# Altium schematic symbol library Ic%.SchLib: 452 symbols (part 6 of 12)
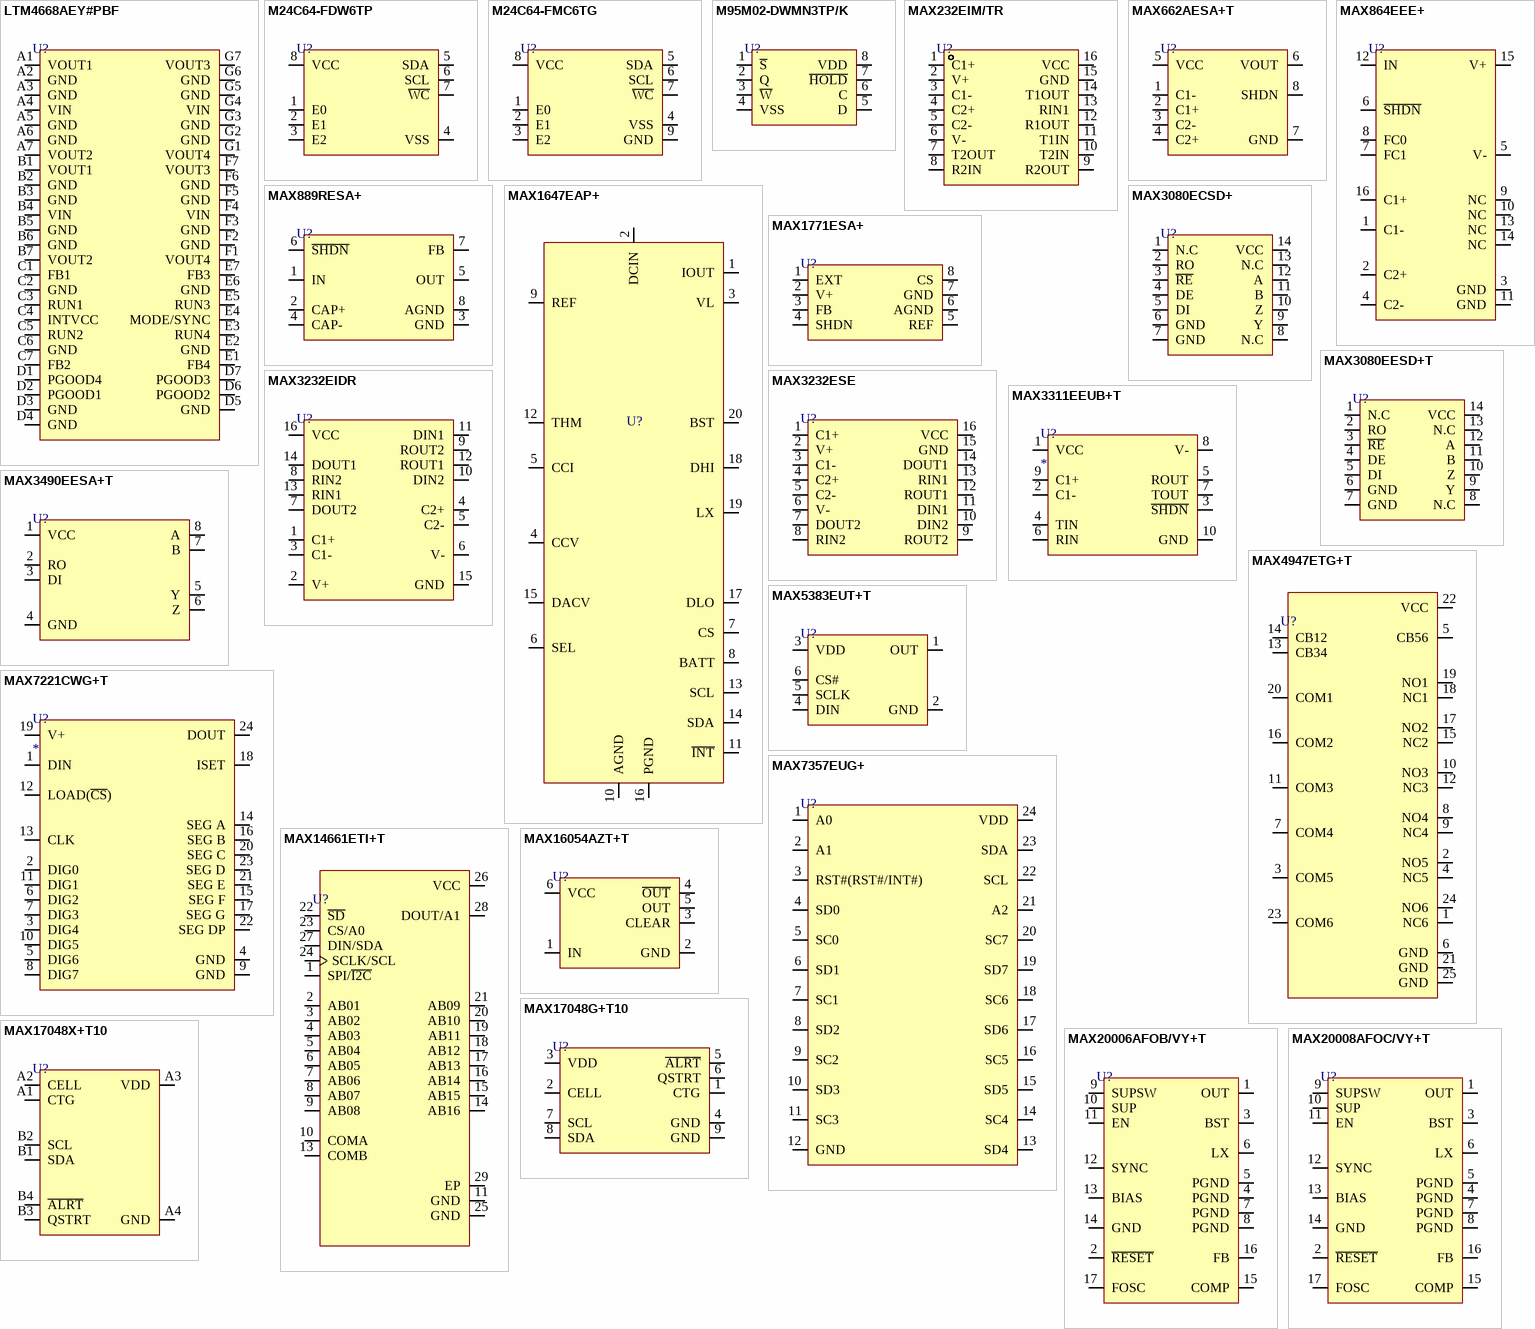
[diagram p28: symbols LTM4668AEY#PBF to MAX20008AFOC/VY+T]

## MAX864EEE+
designator U?
IC REG CHARGE PUMP INV 16QSOP; Manufacturer: Maxim; Manufacturer Part Number: MAX864EEE+; Output Current: 20mA; Output Voltage: 12V; Logic Function: Inverting; Number of Outputs: 2; Switching Frequency: 185kHz; Synchronous Rectifier: No; Topology: Boost; Output Type: Adjustable; Max Supply Voltage: 6V; Min Supply Voltage: 1.75V; Operating Supply Current: 7mA; Min Output Voltage: 3.5V; Supplier: Digikey; Supplier Part Number: MAX864EEE+-ND; RoHS: Yes; Item Type: IC; Stock: 443; Pricing: 1=4.9, 10=4.399, 25=4.1588, 100=3.6042, 300=3.41937, 500=3.06818, 1000=2.58762, 2500=2.45824 (USD); Mounting Technology: Surface Mount; Case/Package: QSOP; Pins: 16; Weight: 0.010159oz; Min Operating Temperature: -40°C; Max Operating Temperature: 85°C; Packaging: Rail/Tube; Package Quantity: 100; Series: -; Min Input Voltage: 1.75V; Max Output Voltage: 12V; Termination: SMD/SMT; Length: 4.98mm; Width: 3.99mm; Height: 1.55mm; Radiation Hardening: No; Lead Free: Lead Free; RoHS Compliant: Yes; Reach SVHC Compliant: No; ComponentLink1URL: https://datasheet.ciiva.com/3215/max864-3215728.pdf?src-supplier=Avnet; ComponentLink1Description: https://datasheet.ciiva.com/3215/max864-3215728.pdf?src-supplier=Avnet; ComponentLink2URL: https://datasheet.ciiva.com/3216/max864-3216791.pdf?src-supplier=Avnet; ComponentLink2Description: https://datasheet.ciiva.com/3216/max864-3216791.pdf?src-supplier=Avnet; ComponentLink3URL: https://datasheet.ciiva.com/4874/max864-4874972.pdf?src-supplier=Mouser; ComponentLink3Description: https://datasheet.ciiva.com/4874/max864-4874972.pdf?src-supplier=Mouser; ComponentLink4URL: https://datasheet.ciiva.com/7994/9917-7994860.pdf?src-supplier=Element14; ComponentLink4Description: https://datasheet.ciiva.com/7994/9917-7994860.pdf?src-supplier=Element14
footprint 16-QSOP
pins: 1 C1-, 2 C2+, 3 GND, 4 C2-, 5 V-, 6 ~{SHDN}, 7 FC1, 8 FC0, 9 NC, 10 NC, 11 GND, 12 IN, 13 NC, 14 NC, 15 V+, 16 C1+

## MAX889RESA+
designator U?
IC REG CHRG PUMP ADJ 200MA 8SOIC; Manufacturer: Maxim; Manufacturer Part Number: MAX889RESA+; Supplier: Mouser; Supplier Part Number: 700-MAX889RESA; RoHS: Yes; Item Type: IC; Stock: 621; Pricing: 1=6.21, 10=5.28, 50=5.28, 100=4.56, 1000=3.28, 10000=3.11 (USD); ComponentLink1URL: https://datasheet.ciiva.com/30477/0900766b81253d0c-30477617.pdf?src-supplier=Rs; ComponentLink1Description: https://datasheet.ciiva.com/30477/0900766b81253d0c-30477617.pdf?src-supplier=Rs; ComponentLink2URL: https://datasheet.ciiva.com/3215/max889-3215733.pdf?src-supplier=Avnet; ComponentLink2Description: https://datasheet.ciiva.com/3215/max889-3215733.pdf?src-supplier=Avnet; ComponentLink3URL: https://datasheet.ciiva.com/4874/max889-4874923.pdf?src-supplier=Mouser; ComponentLink3Description: https://datasheet.ciiva.com/4874/max889-4874923.pdf?src-supplier=Mouser; ComponentLink4URL: https://datasheet.ciiva.com/2028/max889-2028980.pdf?src-supplier=Digikey; ComponentLink4Description: https://datasheet.ciiva.com/2028/max889-2028980.pdf?src-supplier=Digikey
footprint SOIC-8(0.154", 3.90mm Width)
pins: 1 IN, 2 CAP+, 3 GND, 4 CAP-, 5 OUT, 6 ~{SHDN}, 7 FB, 8 AGND

## MAX1647EAP+
designator U?
Battery Charger Lead-Acid/Li-Ion/NiCD/NiMH 4000mA 18V 20-Pin SSOP; Manufacturer: Maxim; Manufacturer Part Number: MAX1647EAP+; Item Type: IC; Output Current: 4A; Operating Supply Voltage: 28V; Supplier 1: Mouser; RoHS: Yes; Stock 1: 19; Pricing 1: 1=14.28, 10=13.13, 50=12.59, 100=11.09, 1000=9.86, 10000=9.86 (USD); Mount: Surface Mount; Case/Package: SSOP; Min Operating Temperature: -40°C; Max Operating Temperature: 85°C; Packaging: Rail/Tube; Radiation Hardening: No; RoHS Compliant: Yes; ComponentLink1URL: http://datasheets.maxim-ic.com/en/ds/MAX1647-MAX1648.pdf?src-supplier=Avnet; ComponentLink1Description: http://datasheets.maxim-ic.com/en/ds/MAX1647-MAX1648.pdf?src-supplier=Avnet; Supplier Part Number 1: 700-MAX1647EAP+; LCSC Part Number: C7456664
footprint SSOP-20-208mil
pins: 1 IOUT, 2 DCIN, 3 VL, 4 CCV, 5 CCI, 6 SEL, 7 CS, 8 BATT, 9 REF, 10 AGND, 11 ~{INT}, 12 THM, 13 SCL, 14 SDA, 15 DACV, 16 PGND, 17 DLO, 18 DHI, 19 LX, 20 BST

## MAX1771ESA+
designator U?
Switching Controllers 12V or Adjustable, High-Efficiency, Low IQ, Step-Up DC-DC Controller; Manufacturer: Maxim; Manufacturer Part Number: MAX1771ESA+; Item Type: IC; Supplier: Mouser; Supplier Part Number: 700-MAX1771ESA; RoHS: Yes; Stock: 3278; Pricing: 1=7.36, 10=6.33, 50=6.23, 100=5.5, 1000=4.19, 10000=4.19 (USD); ComponentLink1URL: https://datasheet.ciiva.com/4877/max1771-100479-4877792.pdf?src-supplier=Mouser; ComponentLink1Description: https://datasheet.ciiva.com/4877/max1771-100479-4877792.pdf?src-supplier=Mouser; ComponentLink2URL: https://datasheet.ciiva.com/14150/max1771-eng-tds-14150776.pdf?src-supplier=Distrelec; ComponentLink2Description: https://datasheet.ciiva.com/14150/max1771-eng-tds-14150776.pdf?src-supplier=Distrelec; ComponentLink3URL: https://datasheet.ciiva.com/3217/max1771-3217307.pdf?src-supplier=Avnet; ComponentLink3Description: https://datasheet.ciiva.com/3217/max1771-3217307.pdf?src-supplier=Avnet; ComponentLink4URL: https://datasheet.ciiva.com/2016/max1771-2016789.pdf?src-supplier=Digikey; ComponentLink4Description: https://datasheet.ciiva.com/2016/max1771-2016789.pdf?src-supplier=Digikey
footprint SOIC-8(0.150", 3.80mm Width)
pins: 1 EXT, 2 V+, 3 FB, 4 SHDN, 5 REF, 6 AGND, 7 GND, 8 CS

## MAX3080ECSD+
designator U?
IC TRANSCEIVER FULL 1/1 14SOIC; Manufacturer: Maxim; Manufacturer Part Number: MAX3080ECSD+; Supplier: Mouser; Supplier Part Number: 700-MAX3080ECSD; RoHS: Yes; Item Type: IC; Stock: 531; Pricing: 1=5.09, 10=4.32, 50=4.32, 100=3.74, 1000=2.68, 10000=2.55 (USD); ComponentLink1URL: https://datasheet.ciiva.com/3028/max3080e-max3089e-3028432.pdf?src-supplier=Avnet; ComponentLink1Description: https://datasheet.ciiva.com/3028/max3080e-max3089e-3028432.pdf?src-supplier=Avnet; ComponentLink2URL: https://datasheet.ciiva.com/30478/0900766b811dea3c-30478288.pdf?src-supplier=Rs; ComponentLink2Description: https://datasheet.ciiva.com/30478/0900766b811dea3c-30478288.pdf?src-supplier=Rs; ComponentLink3URL: https://datasheet.ciiva.com/14429/max3080e-max3089e-14429944.pdf?src-supplier=Avnet; ComponentLink3Description: https://datasheet.ciiva.com/14429/max3080e-max3089e-14429944.pdf?src-supplier=Avnet; ComponentLink4URL: https://datasheet.ciiva.com/1712/max3080e-max3089e-1712792.pdf?src-supplier=Digikey; ComponentLink4Description: https://datasheet.ciiva.com/1712/max3080e-max3089e-1712792.pdf?src-supplier=Digikey; ComponentLink5URL: https://datasheet.ciiva.com/1503/74602-1503433.pdf?src-supplier=Element14; ComponentLink5Description: https://datasheet.ciiva.com/1503/74602-1503433.pdf?src-supplier=Element14
footprint SOIC-14
pins: 1 N.C, 2 RO, 3 ~{RE}, 4 DE, 5 DI, 6 GND, 7 GND, 8 N.C, 9 Y, 10 Z, 11 B, 12 A, 13 N.C, 14 VCC

## MAX3080EESD+T
designator U?
MAX3080 Series 115 kbps 5.25 V Full Duplex RS-485/RS-422 Transceiver - SOIC-14; Manufacturer: Maxim; Manufacturer Part Number: MAX3080EESD+T; Number of Receivers: 1; Operating Supply Voltage: 5V; Max Power Dissipation: 800mW; Output Current: 1uA; Output Voltage: 13V; Supply Current: 375uA; Item Type: IC; Supplier: Digikey; Supplier Part Number: MAX3080EESD+TCT-ND; RoHS: Yes; Category: RS-232 / RS-422 / RS-485 Interface ICs; Stock: 1816; Pricing: 1=6.26, 10=5.625, 25=5.3176, 100=4.6086, 250=4.37228, 500=3.92324, 1000=3.30876 (USD); Mounting Technology: Surface Mount; Case/Package: SOIC; Min Operating Temperature: -40°C; Max Operating Temperature: 85°C; Packaging: Tape and Reel; Number of Transmitters: 1; Logic Function: Transceiver; Package Quantity: 2500; Number of Drivers: 1; Data Rate: 115Kbps; Series: MAX3080E; RoHS Compliant: Yes; Lead Free: Lead Free; ComponentLink1URL: https://datasheet.ciiva.com/12260/max3080e-max3089e-99170-12260438.pdf?src-supplier=Mouser; ComponentLink1Description: https://datasheet.ciiva.com/12260/max3080e-max3089e-99170-12260438.pdf?src-supplier=Mouser; ComponentLink2URL: https://datasheet.ciiva.com/14430/max3080e-max3089e-14430038.pdf?src-supplier=Avnet; ComponentLink2Description: https://datasheet.ciiva.com/14430/max3080e-max3089e-14430038.pdf?src-supplier=Avnet; ComponentLink3URL: https://datasheet.ciiva.com/1774/max3080e-max3089e-1774749.pdf?src-supplier=Digikey; ComponentLink3Description: https://datasheet.ciiva.com/1774/max3080e-max3089e-1774749.pdf?src-supplier=Digikey; Package: 14-SOIC
footprint SOIC-14
pins: 1 N.C, 2 RO, 3 ~{RE}, 4 DE, 5 DI, 6 GND, 7 GND, 8 N.C, 9 Y, 10 Z, 11 B, 12 A, 13 N.C, 14 VCC

## MAX3232EIDR
designator U?
IC RS232 LINE DVR/RCVR 16-SOIC; Manufacturer: Texas Instruments; Manufacturer Part Number: MAX3232EIDR; Number of Transmitters: 2; Data Rate: 250Kbps; Operating Supply Voltage: 5V; Logic Function: Transceiver,Receiver; Number of Transceivers: 1; Supply Current: 1mA; Max Supply Voltage: 5.5V; Min Supply Voltage: 3V; Simplex/Duplex: Full Duplex; Propagation Delay: 0.3us; Supplier 1: Mouser; RoHS: Yes; Category: Interface ICs; Stock 1: 49030; Pricing 1: 1=1.79, 10=1.56, 50=1.56, 100=1.44, 1000=1.44, 10000=1.41 (USD); Mount: Surface Mount; Case/Package: D; Number of Pins: 16; Weight: 0.014829oz; Min Operating Temperature: -40°C; Max Operating Temperature: 85°C; Package Quantity: 1; Packaging: Tape and Reel; Number of Receivers: 2; Number of Drivers: 2; Series: -; Operating Supply Current: 1mA; Radiation Hardening: No; Lead Free: Lead Free; RoHS Compliant: Yes; Reach SVHC Compliant: No; ComponentLink1URL: https://datasheet.ciiva.com/46394/1863621-46394524.pdf?src-supplier=Element14; ComponentLink1Description: https://datasheet.ciiva.com/46394/1863621-46394524.pdf?src-supplier=Element14; ComponentLink2URL: https://datasheet.ciiva.com/46398/1863621-46398054.pdf?src-supplier=Element14; ComponentLink2Description: https://datasheet.ciiva.com/46398/1863621-46398054.pdf?src-supplier=Element14; ComponentLink3URL: https://datasheet.ciiva.com/1703/max3232e-1703394.pdf?src-supplier=Digikey; ComponentLink3Description: https://datasheet.ciiva.com/1703/max3232e-1703394.pdf?src-supplier=Digikey; ComponentLink4URL: https://datasheet.ciiva.com/1703/max3232e-1703393.pdf?src-supplier=Digikey; ComponentLink4Description: https://datasheet.ciiva.com/1703/max3232e-1703393.pdf?src-supplier=Digikey; ComponentLink5URL: https://datasheet.ciiva.com/1703/max3232e-1703395.pdf?src-supplier=Digikey; ComponentLink5Description: https://datasheet.ciiva.com/1703/max3232e-1703395.pdf?src-supplier=Digikey; ComponentLink6URL: https://datasheet.ciiva.com/15151/getdatasheetpartid-49711-15151143.pdf?src-supplier=Verical; ComponentLink6Description: https://datasheet.ciiva.com/15151/getdatasheetpartid-49711-15151143.pdf?src-supplier=Verical; Supplier Part Number 1: 595-MAX3232EIDR; Item Type: IC; LCSC Part Number: C193666
footprint SOIC-16
pins: 1 C1+, 2 V+, 3 C1-, 4 C2+, 5 C2-, 6 V-, 7 DOUT2, 8 RIN2, 9 ROUT2, 10 DIN2, 11 DIN1, 12 ROUT1, 13 RIN1, 14 DOUT1, 15 GND, 16 VCC

## MAX3232ESE
designator U?
250Kbps transceiver 2/2 SOP-16 RS232 ICs ROHS; Manufacturer: UMW; Manufacturer Part Number: MAX3232ESE; Item Type: IC; Package: SOP-16; LCSC Part Number: C2904738; ComponentLink1Description: LCSC; ComponentLink1URL: https://www.lcsc.com/product-detail/RS232-ICs_UMW-Youtai-Semiconductor-Co-Ltd-MAX3232ESE_C2904738.html
footprint SOP-16
pins: 1 C1+, 2 V+, 3 C1-, 4 C2+, 5 C2-, 6 V-, 7 DOUT2, 8 RIN2, 9 ROUT2, 10 DIN2, 11 DIN1, 12 ROUT1, 13 RIN1, 14 DOUT1, 15 GND, 16 VCC

## MAX3311EEUB+T
designator U?
IC TXRX RS232 460KBPS 10-UMAX; Manufacturer: Maxim; Manufacturer Part Number: MAX3311EEUB+T; Simplex/Duplex: Full Duplex; Receiver Hysteresis: 500mV; Supplier: Digikey; Supplier Part Number: MAX3311EEUB+TCT-ND; RoHS: Yes; Category: RS-232 / RS-422 / RS-485 Interface ICs; Stock: 3791; Pricing: 1=5.92, 10=5.32, 25=5.0292, 100=4.3588, 250=4.13524, 500=3.71054, 1000=3.12937 (USD); Mounting Technology: Surface Mount; Case/Package: UMAX; Min Operating Temperature: -40°C; Max Operating Temperature: 85°C; Packaging: Cut Tape; Data Rate: 460Kbps; Series: -; Lead Free: Lead Free; RoHS Compliant: Yes; ComponentLink1URL: https://datasheet.ciiva.com/14430/max3311e-max3313e-14430143.pdf?src-supplier=Avnet; ComponentLink1Description: https://datasheet.ciiva.com/14430/max3311e-max3313e-14430143.pdf?src-supplier=Avnet; ComponentLink2URL: https://datasheet.ciiva.com/1774/max3311e-max3313e-1774738.pdf?src-supplier=Digikey; ComponentLink2Description: https://datasheet.ciiva.com/1774/max3311e-max3313e-1774738.pdf?src-supplier=Digikey; Item Type: IC; Package: MSOP-10; JLCPCB Part Number: C1121855; ComponentLink3Description: JLCPCB; ComponentLink3URL: https://jlcpcb.com/partdetail/1212276-MAX3311EEUBT/C1121855
footprint 10-MSOP
pins: 1 VCC, 2 C1-, 3 ~{SHDN}, 4 TIN, 5 ROUT, 6 RIN, 7 TOUT, 8 V-, 9 C1+, 10 GND

## MAX3490EESA+T
designator U?
IC TXRX RS485/422 10MBPS 8SOIC; Manufacturer: Maxim; Manufacturer Part Number: MAX3490EESA+T; Supplier: Mouser; Supplier Part Number: 700-MAX3490EESAT; RoHS: Yes; Item Type: IC; Stock: 5952; Pricing: 1=5.92, 10=5.35, 50=5.1, 100=4.43, 1000=4.38, 10000=4.34 (USD); ComponentLink1URL: https://datasheet.ciiva.com/3029/max3483e-max3491e-3029646.pdf?src-supplier=Avnet; ComponentLink1Description: https://datasheet.ciiva.com/3029/max3483e-max3491e-3029646.pdf?src-supplier=Avnet; ComponentLink2URL: https://datasheet.ciiva.com/1775/max3483-max3491-1775008.pdf?src-supplier=Digikey; ComponentLink2Description: https://datasheet.ciiva.com/1775/max3483-max3491-1775008.pdf?src-supplier=Digikey; LCSC Part Number: C5342105
footprint SOIC-8(0.154", 3.90mm Width)
pins: 1 VCC, 2 RO, 3 DI, 4 GND, 5 Y, 6 Z, 7 B, 8 A

## MAX4947ETG+T
designator U?
IC SWITCH DPDT X 3 5.5OHM 24TQFN; Manufacturer: Maxim; Manufacturer Part Number: MAX4947ETG+T; Min Supply Voltage: 1.8V; Max Supply Voltage: 5.5V; -3db Bandwidth: 300MHz; Number of Circuits: 3; Supplier: Mouser; LCSC Part Number: C2673164; RoHS: Yes; Item Type: IC; Stock: 1335; Pricing: 1=7.3, 10=6.6, 50=6.29, 100=5.46, 1000=4.14, 10000=3.99 (USD); Pins: 24; Min Operating Temperature: -40°C; Max Operating Temperature: 85°C; Package Quantity: 2500; Packaging: Tape and Reel; Series: -; Radiation Hardening: No; RoHS Compliant: Yes; ComponentLink1URL: https://datasheet.ciiva.com/14437/max4947-max4948-14437442.pdf?src-supplier=Avnet; ComponentLink1Description: https://datasheet.ciiva.com/14437/max4947-max4948-14437442.pdf?src-supplier=Avnet; ComponentLink2URL: https://datasheet.ciiva.com/12190/max4947-max4948-12190170.pdf?src-supplier=Mouser; ComponentLink2Description: https://datasheet.ciiva.com/12190/max4947-max4948-12190170.pdf?src-supplier=Mouser; ComponentLink3URL: https://datasheet.ciiva.com/1685/max4947-max4948-1685783.pdf?src-supplier=Digikey; ComponentLink3Description: https://datasheet.ciiva.com/1685/max4947-max4948-1685783.pdf?src-supplier=Digikey
footprint TQFN-24-EP(4x4)
pins: 1 NC6, 2 NO5, 3 COM5, 4 NC5, 5 CB56, 6 GND, 7 COM4, 8 NO4, 9 NC4, 10 NO3, 11 COM3, 12 NC3, 13 CB34, 14 CB12, 15 NC2, 16 COM2, 17 NO2, 18 NC1, 19 NO1, 20 COM1, 21 GND, 22 VCC, 23 COM6, 24 NO6, 25 GND

## MAX5383EUT+T
designator U?
IC DAC 8BIT V-OUT SOT23-6; Manufacturer: Maxim; Manufacturer Part Number: MAX5383EUT+T; Supplier: Mouser; LCSC Part Number: 700-MAX5383EUTT; RoHS: Yes; Item Type: IC; Stock: 4735; Pricing: 1=4.24, 10=2.74, 50=2.35, 100=1.9, 1000=1.44, 10000=1.41 (USD); ComponentLink1URL: https://datasheet.ciiva.com/1365/max5383-max5385-1365824.pdf?src-supplier=Digikey; ComponentLink1Description: https://datasheet.ciiva.com/1365/max5383-max5385-1365824.pdf?src-supplier=Digikey; ComponentLink2URL: https://datasheet.ciiva.com/1365/max5383-max5385-1365823.pdf?src-supplier=Digikey; ComponentLink2Description: https://datasheet.ciiva.com/1365/max5383-max5385-1365823.pdf?src-supplier=Digikey; ComponentLink3URL: https://datasheet.ciiva.com/1365/max5383-max5385-1365915.pdf?src-supplier=Digikey; ComponentLink3Description: https://datasheet.ciiva.com/1365/max5383-max5385-1365915.pdf?src-supplier=Digikey; ComponentLink4URL: https://datasheet.ciiva.com/3041/max5383-max5385-3041431.pdf?src-supplier=Avnet; ComponentLink4Description: https://datasheet.ciiva.com/3041/max5383-max5385-3041431.pdf?src-supplier=Avnet
footprint SOT-23-6
pins: 1 OUT, 2 GND, 3 VDD, 4 DIN, 5 SCLK, 6 CS#

## MAX7221CWG+T
designator U?
LED Driver 64 Segment 330000uA Supply Current 24-Pin SOIC W / IC DRIVER LED DISP 8DGT 24-SOIC; Manufacturer: Maxim; Manufacturer Part Number: MAX7221CWG+; Max Power Dissipation: 941mW; Number of Segments: 64; High Level Output Current: -45mA; Min Input Voltage: 4V; Max Supply Voltage: 5.5V; Interface: Serial,4-WIRE; Operating Supply Current: 330mA; Low Level Output Current: 320mA; Number of Outputs: 8; Output Voltage: 4.5V; Switching Frequency: 10MHz; Supplier: Digikey; Supplier Part Number: MAX7221CWG+-ND; RoHS: Yes; Category: LED Drivers; Stock: 6345; Pricing: 1=11.66, 10=10.714, 30=10.27033, 120=9.049, 270=8.60485, 510=8.04971, 1020=7.38352 (USD); Mounting Technology: Surface Mount; Case/Package: SOIC; Pins: 24; Weight: 0.025909oz; Min Operating Temperature: 0°C; Max Operating Temperature: 70°C; Package Quantity: 30; Packaging: Rail/Tube; Max Supply Current: 330mA; Series: -; Output Current: 320mA; Min Supply Voltage: 4V; Length: 15.6mm; Width: 7.6mm; Height: 2.35mm; Radiation Hardening: No; Lead Free: Lead Free; RoHS Compliant: Yes; Reach SVHC Compliant: Unknown; ComponentLink1URL: https://datasheet.ciiva.com/1940/max7219-max7221-1940624.pdf?src-supplier=Digikey; ComponentLink1Description: https://datasheet.ciiva.com/1940/max7219-max7221-1940624.pdf?src-supplier=Digikey; ComponentLink2URL: https://datasheet.ciiva.com/29305/170134-da-01-en-ic-max7221cwg-sol24l-29305984.pdf?src-supplier=Conrad; ComponentLink2Description: https://datasheet.ciiva.com/29305/170134-da-01-en-ic-max7221cwg-sol24l-29305984.pdf?src-supplier=Conrad; ComponentLink3URL: https://datasheet.ciiva.com/8068/max7219-max7221-8068217.pdf?src-supplier=Element14; ComponentLink3Description: https://datasheet.ciiva.com/8068/max7219-max7221-8068217.pdf?src-supplier=Element14; ComponentLink4URL: https://datasheet.ciiva.com/1497/26306-1497372.pdf?src-supplier=Element14; ComponentLink4Description: https://datasheet.ciiva.com/1497/26306-1497372.pdf?src-supplier=Element14; ComponentLink5URL: https://datasheet.ciiva.com/5812/26306-5812412.pdf?src-supplier=Farnell; ComponentLink5Description: https://datasheet.ciiva.com/5812/26306-5812412.pdf?src-supplier=Farnell; ComponentLink6URL: https://datasheet.ciiva.com/3163/max7219-max7221-3163774.pdf?src-supplier=Avnet; ComponentLink6Description: https://datasheet.ciiva.com/3163/max7219-max7221-3163774.pdf?src-supplier=Avnet; Item Type: IC
footprint 24-SOIC (0.295", 7.50mm Width)
pins: 1 DIN, 2 DIG0, 3 DIG4, 4 GND, 5 DIG6, 6 DIG2, 7 DIG3, 8 DIG7, 9 GND, 10 DIG5, 11 DIG1, 12 LOAD(~{CS}), 13 CLK, 14 SEG A, 15 SEG F, 16 SEG B, 17 SEG G, 18 ISET, 19 V+, 20 SEG C, 21 SEG E, 22 SEG DP, 23 SEG D, 24 DOUT

## MAX7357EUG+
designator U?
IC MULTIPLEXER 8X1 24TSSOP; Manufacturer: Maxim; Manufacturer Part Number: MAX7357EUG+; Supply Type: Single; Propagation Delay: 0.3ns; Max Power Dissipation: 1.11W; Number of Channels: 8; Operating Supply Current: 65uA; Operating Supply Voltage: 5.5V; Supplier: Mouser; LCSC Part Number: C1557096; RoHS: Yes; Category: Interface ICs; Item Type: IC; Pricing: 1=7.78, 10=6.09, 50=4.85, 100=4.47, 1000=4.13, 10000=4.12 (USD); Mounting Technology: Surface Mount; Case/Package: TSSOP; Pins: 24; Min Operating Temperature: -40°C; Max Operating Temperature: 85°C; Packaging: Rail/Tube; Package Quantity: 62; Logic Function: Multiplexer; Series: -; RoHS Compliant: Yes; ComponentLink1URL: https://datasheet.ciiva.com/1676/max7356-max7358-1676412.pdf?src-supplier=Digikey; ComponentLink1Description: https://datasheet.ciiva.com/1676/max7356-max7358-1676412.pdf?src-supplier=Digikey; ComponentLink2URL: https://datasheet.ciiva.com/14295/max7356-max7358-14295500.pdf?src-supplier=Avnet; ComponentLink2Description: https://datasheet.ciiva.com/14295/max7356-max7358-14295500.pdf?src-supplier=Avnet
footprint 24-TSSOP
pins: 1 A0, 2 A1, 3 RST#(RST#/INT#), 4 SD0, 5 SC0, 6 SD1, 7 SC1, 8 SD2, 9 SC2, 10 SD3, 11 SC3, 12 GND, 13 SD4, 14 SC4, 15 SD5, 16 SC5, 17 SD6, 18 SC6, 19 SD7, 20 SC7, 21 A2, 22 SCL, 23 SDA, 24 VDD

## MAX14661ETI+T
designator U?
IC MUX 16:2 8OHM 28TQFN; Manufacturer: Maxim; Manufacturer Part Number: MAX14661ETI+T; Number of Circuits: 1; -3db Bandwidth: 60MHz; Supplier: Mouser; LCSC Part Number: C2673449; RoHS: Yes; Item Type: IC; Stock: 4736; Pricing: 1=11.47, 10=8.67, 50=7.73, 100=6.68, 1000=5.63, 10000=5.62 (USD); Pins: 28; Min Operating Temperature: -40°C; Max Operating Temperature: 85°C; Packaging: Tape and Reel; Package Quantity: 2500; Series: -; RoHS Compliant: Yes; ComponentLink1URL: http://www.mouser.com/ds/2/256/MAX14661-263830.pdf?src-supplier=Mouser; ComponentLink1Description: http://www.mouser.com/ds/2/256/MAX14661-263830.pdf?src-supplier=Mouser; ComponentLink2URL: https://datasheets.maximintegrated.com/en/ds/MAX14661.pdf?src-supplier=Digikey; ComponentLink2Description: https://datasheets.maximintegrated.com/en/ds/MAX14661.pdf?src-supplier=Digikey; ComponentLink3URL: http://datasheets.maximintegrated.com/en/ds/MAX14661.pdf?src-supplier=Digikey; ComponentLink3Description: http://datasheets.maximintegrated.com/en/ds/MAX14661.pdf?src-supplier=Digikey
footprint 28-TQFN (4x4)
pins: 1 SPI/~{I2C}, 2 AB01, 3 AB02, 4 AB03, 5 AB04, 6 AB05, 7 AB06, 8 AB07, 9 AB08, 10 COMA, 11 GND, 13 COMB, 14 AB16, 15 AB15, 16 AB14, 17 AB13, 18 AB12, 19 AB11, 20 AB10, 21 AB09, 22 ~{SD}, 23 CS/A0, 24 SCLK/SCL, 25 GND, 26 VCC, 27 DIN/SDA, 28 DOUT/A1, 29 EP

## MAX16054AZT+T
designator U?
IC CNTRLR ON/OFF W/DEB TSOT23-6; Manufacturer: Maxim; Manufacturer Part Number: MAX16054AZT+T; Max Power Dissipation: 727W; Max Supply Voltage: 5.5V; Min Supply Voltage: 2.7V; Number of Voltages Monitored: 1; Undervoltage Threshold: 1.8V; Operating Supply Current: 7uA; Watchdog Timer: No; Output Type: PUSH-PULL; Supplier 1: Arrow Electronics; RoHS: Yes; Category: Interface ICs; Stock 1: 3; Pricing 1: 1=2.99700 (USD); Mounting Technology: Surface Mount; Case/Package: SOT-23-6; Pins: 6; Contact Plating: Tin,Matte; Min Operating Temperature: -40°C; Max Operating Temperature: 125°C; Packaging: Tape and Reel; Package Quantity: 1; Series: -; Length: 4mm; Width: 4mm; Height: 0.73mm; Radiation Hardening: No; RoHS Compliant: Yes; ComponentLink1URL: https://datasheet.ciiva.com/4901/max16054-83881-4901086.pdf?src-supplier=Mouser; ComponentLink1Description: https://datasheet.ciiva.com/4901/max16054-83881-4901086.pdf?src-supplier=Mouser; ComponentLink2URL: https://datasheet.ciiva.com/1784/max16054-1784560.pdf?src-supplier=Digi-Key; ComponentLink2Description: https://datasheet.ciiva.com/1784/max16054-1784560.pdf?src-supplier=Digi-Key; ComponentLink3URL: https://datasheet.ciiva.com/14247/max16054-14247770.pdf?src-supplier=Avnet; ComponentLink3Description: https://datasheet.ciiva.com/14247/max16054-14247770.pdf?src-supplier=Avnet; ComponentLink4URL: https://datasheet.ciiva.com/1784/max16054-1784561.pdf?src-supplier=Digi-Key; ComponentLink4Description: https://datasheet.ciiva.com/1784/max16054-1784561.pdf?src-supplier=Digi-Key; ComponentLink5URL: https://datasheet.ciiva.com/1784/max16054-1784562.pdf?src-supplier=Digi-Key; ComponentLink5Description: https://datasheet.ciiva.com/1784/max16054-1784562.pdf?src-supplier=Digi-Key; Supplier Part Number 1: MAX16054AZT+T; LCSC Part Number: C79401; Item Type: IC
footprint TSOT-23-6
pins: 1 IN, 2 GND, 3 CLEAR, 4 ~{OUT}, 5 OUT, 6 VCC

## MAX17048G+T10
designator U?
IC BATT MON LI-ION 1CELL 8TDFN; Manufacturer: Maxim; Manufacturer Part Number: MAX17048G+T10; Output Voltage: 400mV; Operating Supply Current: 23uA; Operating Supply Voltage: 4.5V; Supplier 1: Mouser; RoHS: Yes; Category: Battery Management; Stock 1: 41293; Pricing 1: 1=3.34000, 10=3.00000, 50=2.84000, 100=2.46000, 1000=1.89000, 10000=1.83000 (USD); Mount: Surface Mount; Number of Pins: 8; Contact Plating: Tin,Matte; Min Operating Temperature: -20°C; Max Operating Temperature: 85°C; Packaging: Tape and Reel; Package Quantity: 10000; Series: ModelGauge™; Radiation Hardening: No; RoHS Compliant: Yes; ComponentLink1URL: https://datasheet.ciiva.com/14083/max17048-max17049-14083973.pdf?src-supplier=Digi-Key; ComponentLink1Description: https://datasheet.ciiva.com/14083/max17048-max17049-14083973.pdf?src-supplier=Digi-Key; Supplier Part Number 1: 700-MAX17048G+T10; LCSC Part Number: C2682616; Item Type: IC
footprint 8-TDFN-EP (2x2)
pins: 1 CTG, 2 CELL, 3 VDD, 4 GND, 5 ~{ALRT}, 6 QSTRT, 7 SCL, 8 SDA, 9 GND

## MAX17048X+T10
designator U?
IC BATT MON LI-ION 1CELL 8WLP; Manufacturer: Analog Devices Inc./Maxim Integrated; Manufacturer Part Number: MAX17048X+T10; Package: 8-WLP (1.66x0.92); LCSC Part Number: -; Item Type: IC; ComponentLink1Description: Digikey; ComponentLink1URL: https://www.digikey.com.au/en/products/detail/analog-devices-inc-maxim-integrated/MAX17048X-T10/3758922
footprint 8-WLP (1.66x0.92)
pins: A1 CTG, A2 CELL, A3 VDD, A4 GND, B1 SDA, B2 SCL, B3 QSTRT, B4 ~{ALRT}

## MAX20006AFOB/VY+T
designator U?
IC REG BUCK 3.3V 6A 17FC2QFN; Manufacturer: Maxim; Manufacturer Part Number: MAX20006AFOB/VY+T; Supplier: DigiKey; Supplier Part Number: 505-MAX20006AFOB/VY+TTR-ND; RoHS: Yes; Category: Voltage Regulators - Switching; Pricing: 2500=2.5254 (USD); Item Type: IC
footprint 17-FC2QFN (3.5x3.75)
pins: 1 OUT, 2 ~{RESET}, 3 BST, 4 PGND, 5 PGND, 6 LX, 7 PGND, 8 PGND, 9 SUPSW, 10 SUP, 11 EN, 12 SYNC, 13 BIAS, 14 GND, 15 COMP, 16 FB, 17 FOSC

## MAX20008AFOC/VY+T
designator U?
IC REG BUCK 5V 8A 17FC2QFN; Manufacturer: Analog Devices; Manufacturer Part Number: MAX20008AFOC/VY+T; Supplier: Mouser; Supplier Part Number: 700-MAX20008AFOC/VYT; RoHS: No; Category: Voltage Regulators - Switching; Stock: 4724; Pricing: 1=5.69, 10=5, 50=5, 100=4.18, 1000=3.19, 10000=3.19 (USD); Item Type: IC
footprint 17-FC2QFN (3.5x3.75)
pins: 1 OUT, 2 ~{RESET}, 3 BST, 4 PGND, 5 PGND, 6 LX, 7 PGND, 8 PGND, 9 SUPSW, 10 SUP, 11 EN, 12 SYNC, 13 BIAS, 14 GND, 15 COMP, 16 FB, 17 FOSC

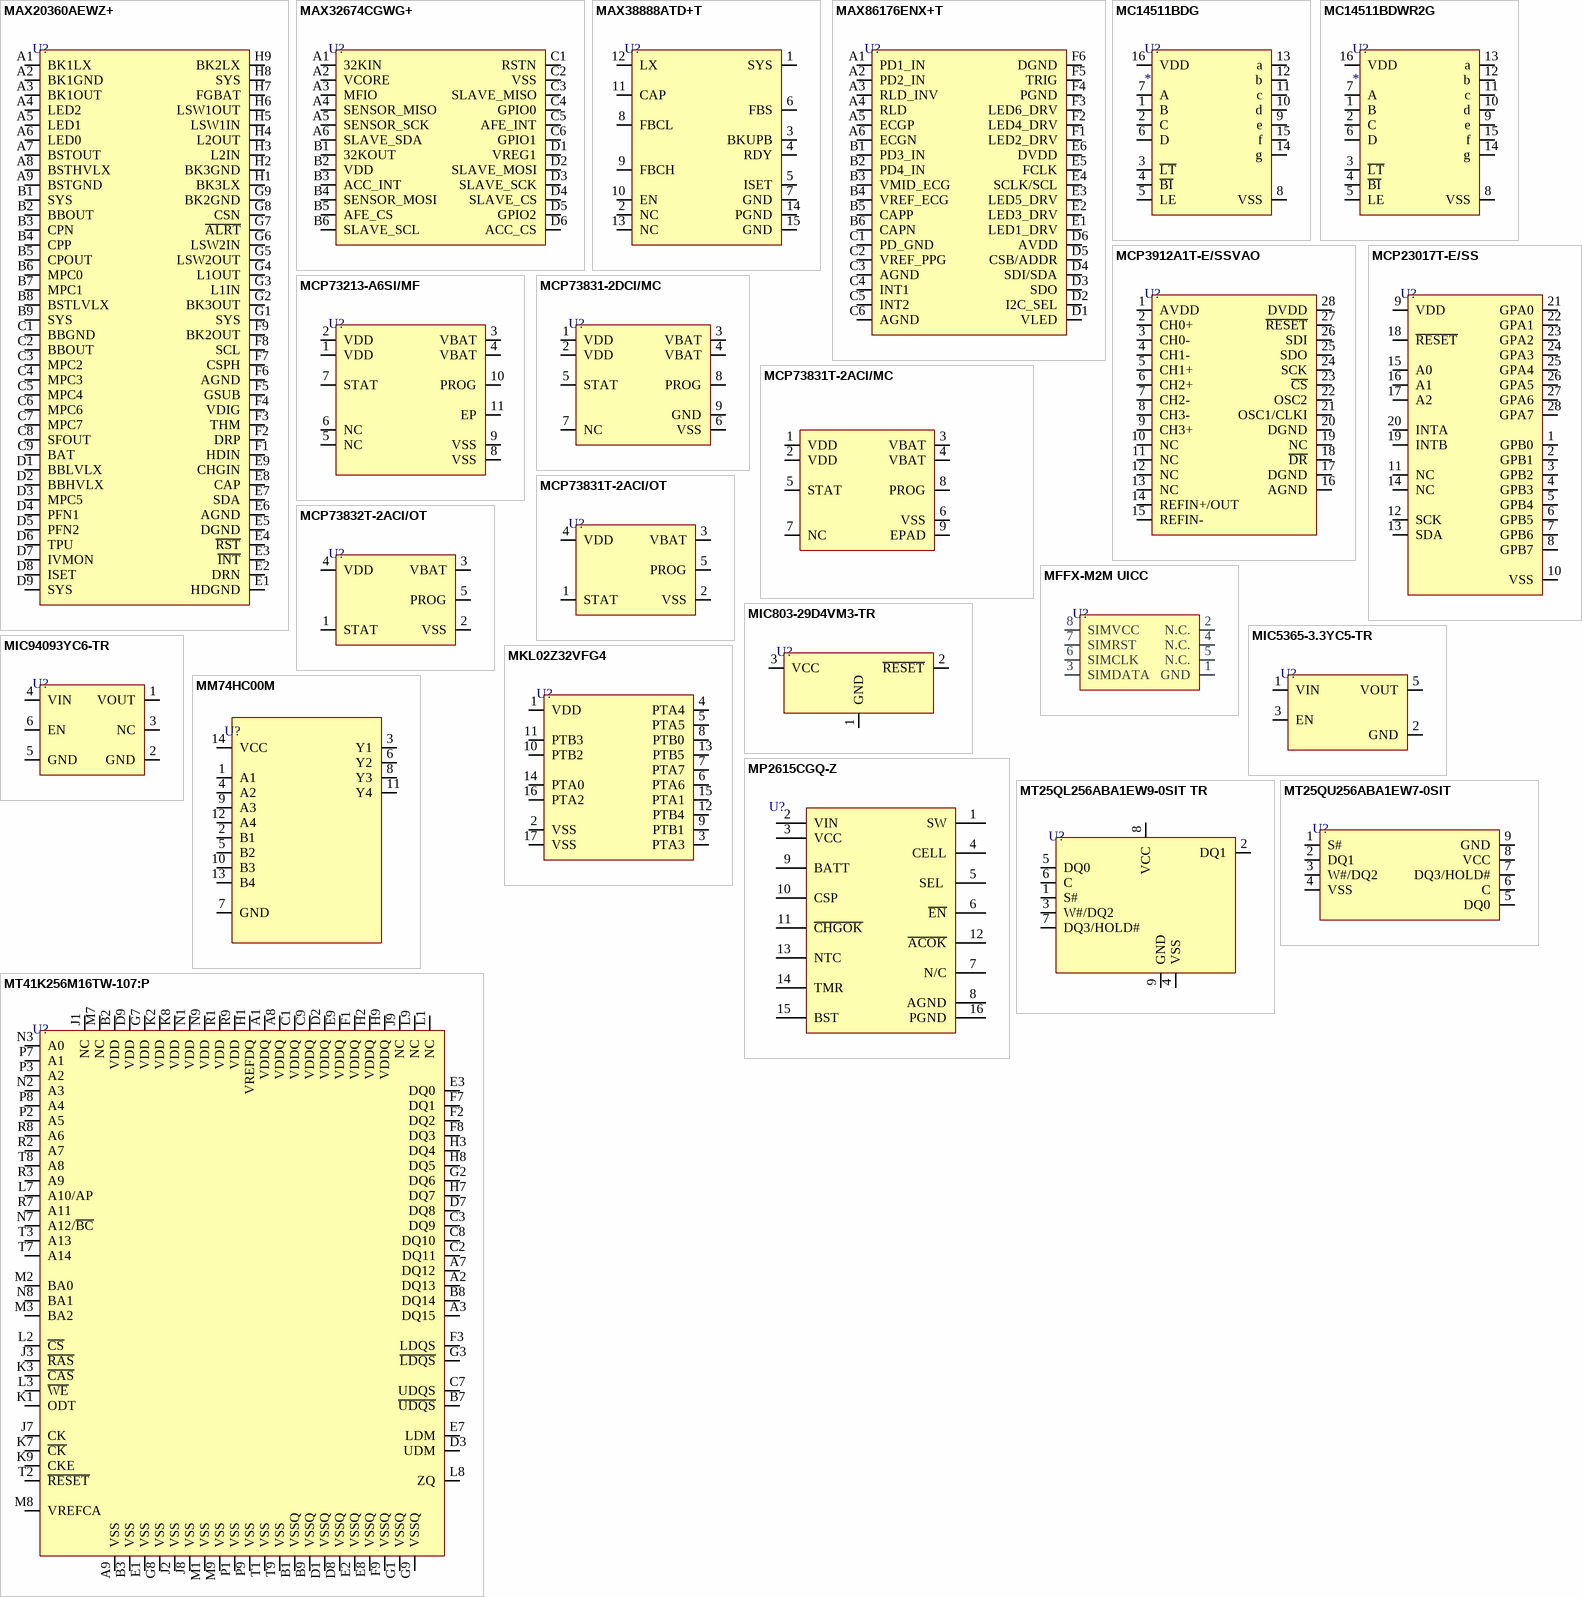
[diagram p11: symbols MAX20360AEWZ+ to MT41K256M16TW-107:P]

## MAX20360AEWZ+
designator U?
IC BATT FUEL LI-ION 1C 72WLP; Manufacturer: Analog Devices; Manufacturer Part Number: MAX20360AEWZ+; Supplier: Digikey; Supplier Part Number: 505-MAX20360AEWZ+-ND; Item Type: IC
footprint 72-WLP (4.88x4.19)
pins: A1 BK1LX, A2 BK1GND, A3 BK1OUT, A4 LED2, A5 LED1, A6 LED0, A7 BSTOUT, A8 BSTHVLX, A9 BSTGND, B1 SYS, B2 BBOUT, B3 CPN, B4 CPP, B5 CPOUT, B6 MPC0, B7 MPC1, B8 BSTLVLX, B9 SYS, C1 BBGND, C2 BBOUT, C3 MPC2, C4 MPC3, C5 MPC4, C6 MPC6, C7 MPC7, C8 SFOUT, C9 BAT, D1 BBLVLX, D2 BBHVLX, D3 MPC5, D4 PFN1, D5 PFN2, D6 TPU, D7 IVMON, D8 ISET, D9 SYS, E1 HDGND, E2 DRN, E3 ~{INT}, E4 ~{RST}, E5 DGND, E6 AGND, E7 SDA, E8 CAP, E9 CHGIN, F1 HDIN, F2 DRP, F3 THM, F4 VDIG, F5 GSUB, F6 AGND, F7 CSPH, F8 SCL, F9 BK2OUT, G1 SYS, G2 BK3OUT, G3 L1IN, G4 L1OUT, G5 LSW2OUT, G6 LSW2IN, G7 ~{ALRT}, G8 CSN, G9 BK2GND, H1 BK3LX, H2 BK3GND, H3 L2IN, H4 L2OUT, H5 LSW1IN, H6 LSW1OUT, H7 FGBAT, H8 SYS, H9 BK2LX

## MAX32674CGWG+
designator U?
SENSOR/ALGORITHM HUB; Manufacturer: Analog Devices; Manufacturer Part Number: MAX32674CGWG+; Item Type: IC; Supplier: Digikey; Supplier Part Number: 175-MAX32674CGWG+TR-ND; RoHS: No
footprint 24-WLP (2.5x1.75)
pins: A1 32KIN, A2 VCORE, A3 MFIO, A4 SENSOR_MISO, A5 SENSOR_SCK, A6 SLAVE_SDA, B1 32KOUT, B2 VDD, B3 ACC_INT, B4 SENSOR_MOSI, B5 AFE_CS, B6 SLAVE_SCL, C1 RSTN, C2 VSS, C3 SLAVE_MISO, C4 GPIO0, C5 AFE_INT, C6 GPIO1, D1 VREG1, D2 SLAVE_MOSI, D3 SLAVE_SCK, D4 SLAVE_CS, D5 GPIO2, D6 ACC_CS

## MAX38888ATD+T
designator U?
IC BATT MFUNC SUPERCAP 14TDFN; Manufacturer: Maxim; Manufacturer Part Number: MAX38888ATD+T; Supplier 1: Mouser; RoHS: No; Category: Battery Management; Stock 1: 1586; Pricing 1: 1=8.16, 10=7.38, 50=7.04, 100=6.11, 1000=5.15, 10000=4.97 (USD); Supplier Part Number 1: 700-MAX38888ATD+T; LCSC Part Number: C2931491; Item Type: IC
footprint TDFN-14-EP(3x3)
pins: 1 SYS, 2 NC, 3 BKUPB, 4 RDY, 5 ISET, 6 FBS, 7 GND, 8 FBCL, 9 FBCH, 10 EN, 11 CAP, 12 LX, 13 NC, 14 PGND, 15 GND

## MAX86176ENX+T
designator U?
Ultra-Low-Power, Optical PPG and Single-Lead ECG AFE; Manufacturer: Analog Devices; Manufacturer Part Number: MAX86176ENX+T; Item Type: IC; Supplier: Digikey; ComponentLink1Description: LCSC; ComponentLink1URL: https://www.lcsc.com/product-detail/Specialized-Sensors_Analog-Devices-Inc-Maxim-Integrated-MAX86176ENX-T_C3197546.html
footprint 36-WLP (2.728x2.708)
pins: A1 PD1_IN, A2 PD2_IN, A3 RLD_INV, A4 RLD, A5 ECGP, A6 ECGN, B1 PD3_IN, B2 PD4_IN, B3 VMID_ECG, B4 VREF_ECG, B5 CAPP, B6 CAPN, C1 PD_GND, C2 VREF_PPG, C3 AGND, C4 INT1, C5 INT2, C6 AGND, D1 VLED, D2 I2C_SEL, D3 SDO, D4 SDI/SDA, D5 CSB/ADDR, D6 AVDD, E1 LED1_DRV, E2 LED3_DRV, E3 LED5_DRV, E4 SCLK/SCL, E5 FCLK, E6 DVDD, F1 LED2_DRV, F2 LED4_DRV, F3 LED6_DRV, F4 PGND, F5 TRIG, F6 DGND

## MC14511BDG
designator U?
MC14511BDG; Decoder; Driver; Latch; Non-Inverting; 3 - 18 V; 16-Pin SOIC; Manufacturer: ON Semiconductor; Number of Channels: 1NUMBER; Item Type: IC; Supplier: Digikey; Supplier Part Number: MC14511BDGOS-ND; Manufacturer Part Number: MC14511BDG; RoHS: Yes; Category: Latches and Flip Flops; Stock: 462; Pricing: 1=0.87, 10=0.78, 48=0.74042, 144=0.56847, 288=0.5024, 528=0.47595, 1008=0.37019, 2544=0.35167, 5040=0.33845 (USD); ComponentLink1URL: https://datasheet.ciiva.com/15092/getdatasheetpartid-72059-15092223.pdf?src-supplier=Verical; ComponentLink1Description: https://datasheet.ciiva.com/15092/getdatasheetpartid-72059-15092223.pdf?src-supplier=Verical; ComponentLink2URL: https://datasheet.ciiva.com/8251/mc14511b-d-8251726.pdf?src-supplier=Avnet; ComponentLink2Description: https://datasheet.ciiva.com/8251/mc14511b-d-8251726.pdf?src-supplier=Avnet; ComponentLink3URL: https://datasheet.ciiva.com/1940/mc14511b-d-1940500.pdf?src-supplier=Digikey; ComponentLink3Description: https://datasheet.ciiva.com/1940/mc14511b-d-1940500.pdf?src-supplier=Digikey; ComponentLink4URL: https://datasheet.ciiva.com/16446/mc14511b-d-16446076.pdf?src-supplier=Future+Electronics; ComponentLink4Description: https://datasheet.ciiva.com/16446/mc14511b-d-16446076.pdf?src-supplier=Future+Electronics; LCSC Part Number: C906828; ComponentLink5Description: LCSC; ComponentLink5URL: https://www.lcsc.com/product-detail/Signal-Switches-Encoders-Decoders-Multiplexers_onsemi-MC14511BDG_C906828.html
footprint 16-SOIC (0.154", 3.90mm Width)
pins: 1 B, 2 C, 3 ~{LT}, 4 ~{BI}, 5 LE, 6 D, 7 A, 8 VSS, 9 e, 10 d, 11 c, 12 b, 13 a, 14 g, 15 f, 16 VDD

## MC14511BDWR2G
designator U?
MC14511B Series 3 to 18 Vdc BCD-to-7 Segment Latch/Decoder/Driver - SOIC-16W; Manufacturer: ON Semiconductor; Manufacturer Part Number: MC14511BDWR2G; Item Type: IC; Supplier: Digikey; Supplier Part Number: 488-MC14511BDWR2GCT-ND; RoHS: Yes; Category: Latches and Flip Flops; Stock: 830; Pricing: 1=1.13, 10=1.01, 25=0.9588, 100=0.7364, 250=0.65072, 500=0.61648 (USD); ComponentLink1URL: https://datasheet.ciiva.com/6613/mc14511b-d-6613618.pdf?src-supplier=Digikey; ComponentLink1Description: https://datasheet.ciiva.com/6613/mc14511b-d-6613618.pdf?src-supplier=Digikey; ComponentLink2URL: https://datasheet.ciiva.com/15092/getdatasheetpartid-196868-15092321.pdf?src-supplier=Verical; ComponentLink2Description: https://datasheet.ciiva.com/15092/getdatasheetpartid-196868-15092321.pdf?src-supplier=Verical; ComponentLink3URL: https://datasheet.ciiva.com/6613/mc14511b-d-6613625.pdf?src-supplier=Digikey; ComponentLink3Description: https://datasheet.ciiva.com/6613/mc14511b-d-6613625.pdf?src-supplier=Digikey; ComponentLink4URL: https://datasheet.ciiva.com/6613/mc14511b-d-6613627.pdf?src-supplier=Digikey; ComponentLink4Description: https://datasheet.ciiva.com/6613/mc14511b-d-6613627.pdf?src-supplier=Digikey; ComponentLink5URL: https://datasheet.ciiva.com/16446/mc14511b-d-16446078.pdf?src-supplier=Future+Electronics; ComponentLink5Description: https://datasheet.ciiva.com/16446/mc14511b-d-16446078.pdf?src-supplier=Future+Electronics; Package: 16-SOIC (0.295", 7.50mm Width); LCSC Part Number: C899672; ComponentLink6Description: LCSC; ComponentLink6URL: https://www.lcsc.com/product-detail/Signal-Switches-Encoders-Decoders-Multiplexers_onsemi-MC14511BDWR2G_C899672.html
footprint 16-SOIC (0.295", 7.50mm Width)
pins: 1 B, 2 C, 3 ~{LT}, 4 ~{BI}, 5 LE, 6 D, 7 A, 8 VSS, 9 e, 10 d, 11 c, 12 b, 13 a, 14 g, 15 f, 16 VDD

## MCP3912A1T-E/SSVAO
designator U?
FOUR CHANNEL ENERGY METER FRONT; Manufacturer: Microchip Technology; Manufacturer Part Number: MCP3912A1T-E/SSVAO; Item Type: IC; Package: 28-SSOP; LCSC Part Number: -; ComponentLink1Description: Digikey; ComponentLink1URL: https://www.digikey.com/en/products/detail/microchip-technology/MCP3912A1T-E-SSVAO/19917129?s=N4IgTCBcDaILIGEAKBmAnARggXQL5A
footprint SSOP-28-208mil
pins: 1 AVDD, 2 CH0+, 3 CH0-, 4 CH1-, 5 CH1+, 6 CH2+, 7 CH2-, 8 CH3-, 9 CH3+, 10 NC, 11 NC, 12 NC, 13 NC, 14 REFIN+/OUT, 15 REFIN-, 16 AGND, 17 DGND, 18 ~{DR}, 19 NC, 20 DGND, 21 OSC1/CLKI, 22 OSC2, 23 ~{CS}, 24 SCK, 25 SDO, 26 SDI, 27 ~{RESET}, 28 DVDD

## MCP23017T-E/SS
designator U?
IC XPNDR 1.7MHZ I2C 28SSOP; Manufacturer: Microchip; Manufacturer Part Number: MCP23017T-E/SS; Operating Supply Voltage: 5.5V; Interface: I2C,Serial; Number of Channels: 1; Output Current: 25mA; Number of I/Os: 16; Power Dissipation: 700mW; Clock Frequency: 10MHz; Output Type: PUSH-PULL; Supply Current: 1mA; Supplier 1: Digi-Key; RoHS: Yes; Category: Interface ICs; Stock 1: 26314; Pricing 1: 1=1.69, 25=1.4, 100=1.28 (USD); Mounting Technology: Surface Mount; Case/Package: SSOP; Pins: 28; Min Operating Temperature: -40°C; Max Operating Temperature: 125°C; Package Quantity: 2100; Series: -; Packaging: Tape and Reel; Frequency: 1.7MHz; Number of Bits: 16; Nominal Supply Voltage: 5.5V; Lead Free: Lead Free; RoHS Compliant: Yes; ComponentLink1URL: https://datasheet.ciiva.com/12267/21952b-12267583.pdf?src-supplier=Mouser; ComponentLink1Description: https://datasheet.ciiva.com/12267/21952b-12267583.pdf?src-supplier=Mouser; ComponentLink2URL: https://datasheet.ciiva.com/8128/21952b-8128586.pdf?src-supplier=Avnet; ComponentLink2Description: https://datasheet.ciiva.com/8128/21952b-8128586.pdf?src-supplier=Avnet; ComponentLink3URL: https://datasheet.ciiva.com/16454/filehandler-aspxddocname-en023709-16454267.pdf?src-supplier=Future+Electronics; ComponentLink3Description: https://datasheet.ciiva.com/16454/filehandler-aspxddocname-en023709-16454267.pdf?src-supplier=Future+Electronics; ComponentLink4URL: https://datasheet.ciiva.com/1780/21952b-1780738.pdf?src-supplier=Digi-Key; ComponentLink4Description: https://datasheet.ciiva.com/1780/21952b-1780738.pdf?src-supplier=Digi-Key; Supplier Part Number 1: MCP23017T-E/SSCT-ND; LCSC Part Number: C558584; Item Type: IC
footprint SSOP-28-208mil
pins: 1 GPB0, 2 GPB1, 3 GPB2, 4 GPB3, 5 GPB4, 6 GPB5, 7 GPB6, 8 GPB7, 9 VDD, 10 VSS, 11 NC, 12 SCK, 13 SDA, 14 NC, 15 A0, 16 A1, 17 A2, 18 ~{RESET}, 19 INTB, 20 INTA, 21 GPA0, 22 GPA1, 23 GPA2, 24 GPA3, 25 GPA4, 26 GPA5, 27 GPA6, 28 GPA7

## MCP73213-A6SI/MF
designator U?
IC BATT CONTRL LI-ION 2CEL 10DFN; Manufacturer: Microchip; Manufacturer Part Number: MCP73213-A6SI/MF; Number of Cells: 2; Max Supply Voltage: 18V; Min Supply Voltage: 4.2V; Output Voltage: 8.4V; Max Output current: 1.1A; Operating Supply Current: 700uA; Drain to Source Resistance: 350mR; Max Output Voltage: 8.85V; Min Output Voltage: 8.15V; Fault Protection: Over Voltage; Supplier 1: Rs; RoHS: Yes; Category: Battery Management; Stock 1: 128; Pricing 1: 1=-1.00000, 25=1.85000, 100=1.76000 (GBP); Mounting Technology: Surface Mount; Case/Package: DFN; Pins: 10; Min Operating Temperature: -40°C; Max Operating Temperature: 85°C; Package Quantity: 120; Packaging: Rail/Tube; Number of Channels: 2; Max Charge Current: 1.1A; Voltage Rating: 8.85V; Series: -; Battery Pack Voltage: 8.4V; Length: 3mm; Width: 3mm; Height: 0.88mm; Radiation Hardening: No; Reach SVHC Compliant: Yes; Lead Free: Lead Free; RoHS Compliant: Yes; ComponentLink1URL: https://datasheet.ciiva.com/1137/554364-1137792.pdf?src-supplier=Element14; ComponentLink1Description: https://datasheet.ciiva.com/1137/554364-1137792.pdf?src-supplier=Element14; ComponentLink2URL: https://datasheet.ciiva.com/16453/filehandler-aspxddocname-en544011-16453863.pdf?src-supplier=Future+Electronics; ComponentLink2Description: https://datasheet.ciiva.com/16453/filehandler-aspxddocname-en544011-16453863.pdf?src-supplier=Future+Electronics; ComponentLink3URL: https://datasheet.ciiva.com/1137/22190b-1137793.pdf?src-supplier=Element14; ComponentLink3Description: https://datasheet.ciiva.com/1137/22190b-1137793.pdf?src-supplier=Element14; ComponentLink4URL: https://datasheet.ciiva.com/4873/22190a-13379-4873436.pdf?src-supplier=Mouser; ComponentLink4Description: https://datasheet.ciiva.com/4873/22190a-13379-4873436.pdf?src-supplier=Mouser; ComponentLink5URL: https://datasheet.ciiva.com/3213/22190b-3213399.pdf?src-supplier=Avnet; ComponentLink5Description: https://datasheet.ciiva.com/3213/22190b-3213399.pdf?src-supplier=Avnet; ComponentLink6URL: https://datasheet.ciiva.com/1933/22190b-1933113.pdf?src-supplier=Digi-Key; ComponentLink6Description: https://datasheet.ciiva.com/1933/22190b-1933113.pdf?src-supplier=Digi-Key; Supplier Part Number 1: 6878660; LCSC Part Number: C60668; Item Type: IC
footprint TDFN-10-EP(3x3)
pins: 1 VDD, 2 VDD, 3 VBAT, 4 VBAT, 5 NC, 6 NC, 7 STAT, 8 VSS, 9 VSS, 10 PROG, 11 EP

## MCP73831-2DCI/MC
designator U?
IC BATT CONTRL LI-ION 1CELL 8DFN; Manufacturer: Microchip; Manufacturer Part Number: MCP73831-2DCI/MC; Supplier: Digi-Key; Supplier Part Number: MCP73831-2DCI/MC-ND; RoHS: Yes; Category: Battery Management; Stock: 1881; Pricing: 1=0.82, 25=0.7, 100=0.63 (USD); ComponentLink1URL: https://datasheet.ciiva.com/12238/21984e-53484-12238219.pdf?src-supplier=Mouser; ComponentLink1Description: https://datasheet.ciiva.com/12238/21984e-53484-12238219.pdf?src-supplier=Mouser; ComponentLink2URL: https://datasheet.ciiva.com/3215/21984e-3215293.pdf?src-supplier=Avnet; ComponentLink2Description: https://datasheet.ciiva.com/3215/21984e-3215293.pdf?src-supplier=Avnet; ComponentLink3URL: https://datasheet.ciiva.com/1933/21984e-1933417.pdf?src-supplier=Digi-Key; ComponentLink3Description: https://datasheet.ciiva.com/1933/21984e-1933417.pdf?src-supplier=Digi-Key; LCSC Part Number: C635037; Item Type: IC
footprint DFN-8-EP(2x3)
pins: 1 VDD, 2 VDD, 3 VBAT, 4 VBAT, 5 STAT, 6 VSS, 7 NC, 8 PROG, 9 GND

## MCP73831T-2ACI/MC
designator U?
IC BATT CONTRL LI-ION 1CELL 8DFN; Manufacturer: Microchip Technology; Manufacturer Part Number: MCP73831T-2ACI/MC; Package: 8-DFN (2x3); Item Type: IC; ComponentLink1Description: JLCPCB; ComponentLink1URL: https://jlcpcb.com/partdetail/MicrochipTech-MCP73831T_2ACIMC/C411870; Supplier: Digi-Key; Supplier Part Number: MCP73831T-2ACI/MCCT-ND; RoHS: Yes; Category: Battery Management; Stock: 24537; Pricing: 1=0.79, 25=0.65 (USD); ComponentLink2URL: https://datasheet.ciiva.com/1933/21984e-1933405.pdf?src-supplier=Digi-Key; ComponentLink2Description: https://datasheet.ciiva.com/1933/21984e-1933405.pdf?src-supplier=Digi-Key
footprint DFN-8-EP(2x3)
pins: 1 VDD, 2 VDD, 3 VBAT, 4 VBAT, 5 STAT, 6 VSS, 7 NC, 8 PROG, 9 EPAD

## MCP73831T-2ACI/OT
designator U?
IC BATT CNTL LI-ION 1CEL SOT23-5; Manufacturer: Microchip; Manufacturer Part Number: MCP73831T-2ACI/OT; Number of Cells: 1; Max Supply Voltage: 6V; Output Voltage: 4.2V; Min Supply Voltage: 3.75V; Output Current: 500mA; Max Output Voltage: 4.5V; Max Power Dissipation: 1.54W; Drain to Source Resistance: 350mR; Min Output Voltage: 4.168V; Voltage Rating: 4.534V; Fault Protection: Over Voltage; Supplier: Rs; Supplier Part Number: 7386360; RoHS: Yes; Category: Battery Management; Stock: 95; Pricing: 5=0.708, 25=0.684, 100=0.664 (GBP); Mounting Technology: Surface Mount; Case/Package: SOT-23; Pins: 5; Weight: 0.00709oz; Min Operating Temperature: -40°C; Max Operating Temperature: 85°C; Number of Outputs: 1; Packaging: Tape and Reel; Number of Channels: 1; Termination: SMD/SMT; Max Charge Current: 500mA; Series: -; Battery Pack Voltage: 4.2V; Length: 3.1mm; Width: 1.8mm; Height: 1.3mm; Radiation Hardening: No; Reach SVHC Compliant: No; Lead Free: Lead Free; RoHS Compliant: Yes; ComponentLink1URL: https://datasheet.ciiva.com/22828/0900766b80d2b53a-22828876.pdf?src-supplier=Rs; ComponentLink1Description: https://datasheet.ciiva.com/22828/0900766b80d2b53a-22828876.pdf?src-supplier=Rs; ComponentLink2URL: https://datasheet.ciiva.com/26344/651521-da-01-en-contr-mcp73831t-2aci-ot-sot-23-5-mcp-26344458.pdf?src-supplier=Conrad; ComponentLink2Description: https://datasheet.ciiva.com/26344/651521-da-01-en-contr-mcp73831t-2aci-ot-sot-23-5-mcp-26344458.pdf?src-supplier=Conrad; ComponentLink3URL: https://datasheet.ciiva.com/1137/630369-1137803.pdf?src-supplier=Element14; ComponentLink3Description: https://datasheet.ciiva.com/1137/630369-1137803.pdf?src-supplier=Element14; ComponentLink4URL: https://datasheet.ciiva.com/28626/630369-28626439.pdf?src-supplier=Element14; ComponentLink4Description: https://datasheet.ciiva.com/28626/630369-28626439.pdf?src-supplier=Element14; ComponentLink5URL: https://datasheet.ciiva.com/46385/630369-46385324.pdf?src-supplier=Element14; ComponentLink5Description: https://datasheet.ciiva.com/46385/630369-46385324.pdf?src-supplier=Element14; ComponentLink6URL: https://datasheet.ciiva.com/1144/630369-1144461.pdf?src-supplier=Newark; ComponentLink6Description: https://datasheet.ciiva.com/1144/630369-1144461.pdf?src-supplier=Newark; LCSC Part Number: C424093; Item Type: IC
footprint SOT-23-5
pins: 1 STAT, 2 VSS, 3 VBAT, 4 VDD, 5 PROG

## MCP73832T-2ACI/OT
designator U?
IC LI-ION/LI-POLY CTRLR SOT23-5; Manufacturer: Microchip; Manufacturer Part Number: MCP73832T-2ACI/OT; Supplier: Rs; Supplier Part Number: 7386364P; RoHS: Yes; Category: Battery Management; Stock: 5495; Pricing: 25=0.6, 100=0.582 (GBP); ComponentLink1URL: https://datasheet.ciiva.com/1931/21984e-1931959.pdf?src-supplier=Digi-Key; ComponentLink1Description: https://datasheet.ciiva.com/1931/21984e-1931959.pdf?src-supplier=Digi-Key; ComponentLink2URL: https://datasheet.ciiva.com/1931/21984e-1931960.pdf?src-supplier=Digi-Key; ComponentLink2Description: https://datasheet.ciiva.com/1931/21984e-1931960.pdf?src-supplier=Digi-Key; ComponentLink3URL: https://datasheet.ciiva.com/1931/21984e-1931961.pdf?src-supplier=Digi-Key; ComponentLink3Description: https://datasheet.ciiva.com/1931/21984e-1931961.pdf?src-supplier=Digi-Key; LCSC Part Number: C38066; Item Type: IC
footprint SOT-23-5
pins: 1 STAT, 2 VSS, 3 VBAT, 4 VDD, 5 PROG

## MFFX-M2M UICC
designator U?
E-SIM IC; Manufacturer Part Number: MFFX-M2M UICC; Manufacturer: -; Package: MFFX; Item Type: IC
footprint MFFX
pins: 1 GND, 2 N.C., 3 SIMDATA, 4 N.C., 5 N.C., 6 SIMCLK, 7 SIMRST, 8 SIMVCC

## MIC803-29D4VM3-TR
designator U?
IC SUPERVISOR 1 CHANNEL SOT23-3; Manufacturer: Microchip; Manufacturer Part Number: MIC803-29D4VM3-TR; Min Supply Voltage: 1V; Max Supply Voltage: 5.5V; Number of Voltages Monitored: 1; Reset: Active Low; Reset Timeout: 1.12s; Threshold Voltage: 2.93V; Operating Supply Current: 4.5uA; Watchdog Timer: No; Max Reset Threshold Voltage: 3.05V; Supply Current: 18uA; Supplier: Digikey; LCSC Part Number: C626154; RoHS: Yes; Item Type: IC; Stock: 5352; Pricing: 1=0.43, 25=0.35, 100=0.33 (USD); Mounting Technology: Surface Mount; Case/Package: SOT-23-3; Pins: 3; Min Operating Temperature: -40°C; Max Operating Temperature: 125°C; Type: Simple Reset/Power-On Reset; Packaging: Tape and Reel; Number of Elements: 1; Series: -; Reach SVHC Compliant: No; RoHS Compliant: Yes; ComponentLink1URL: https://datasheet.ciiva.com/5838/1441861-5838549.pdf?src-supplier=Farnell; ComponentLink1Description: https://datasheet.ciiva.com/5838/1441861-5838549.pdf?src-supplier=Farnell; ComponentLink2URL: https://datasheet.ciiva.com/12957/mic803-12957068.pdf?src-supplier=Mouser; ComponentLink2Description: https://datasheet.ciiva.com/12957/mic803-12957068.pdf?src-supplier=Mouser; ComponentLink3URL: https://datasheet.ciiva.com/16462/mic803-16462056.pdf?src-supplier=Future+Electronics; ComponentLink3Description: https://datasheet.ciiva.com/16462/mic803-16462056.pdf?src-supplier=Future+Electronics
footprint SOT-23 (TRANS NPN 40V 0.6A SOT23)
pins: 1 GND, 2 ~{RESET}, 3 VCC

## MIC5365-3.3YC5-TR
designator U?
IC REG LINEAR 3.3V 150MA SC70-5; Manufacturer: Microchip; Manufacturer Part Number: MIC5365-3.3YC5-TR; Max Supply Voltage: 5.5V; Min Supply Voltage: 2.5V; Number of Channels: 1NUMBER; Output Voltage Accuracy: 2%; Supplier: Arrow Electronics; LCSC Part Number: C73103; RoHS: Yes; Item Type: IC; Stock: 3000; Pricing: 3000=0.1314 (USD); Lead Free: 5697LeadFree; ComponentLink1URL: https://datasheet.ciiva.com/16466/mic5365-16466603.pdf?src-supplier=Future+Electronics; ComponentLink1Description: https://datasheet.ciiva.com/16466/mic5365-16466603.pdf?src-supplier=Future+Electronics
footprint SC70-5
pins: 1 VIN, 2 GND, 3 EN, 5 VOUT

## MIC94093YC6-TR
designator U?
IC PWR SWITCH P-CHAN 1:1 SC70-6; Manufacturer: Microchip Tech; Manufacturer Part Number: MIC94093YC6-TR; Package: SC-70-6; LCSC Part Number: C626244; Item Type: IC; ComponentLink1Description: LCSC; ComponentLink1URL: https://www.lcsc.com/product-detail/Power-Distribution-Switches_Microchip-Tech-MIC94093YC6-TR_C626244.html
footprint SC-70-6
pins: 1 VOUT, 2 GND, 3 NC, 4 VIN, 5 GND, 6 EN

## MKL02Z32VFG4
designator U?
IC MCU 32BIT 32KB FLASH 16QFN; Manufacturer: NXP USA; Manufacturer Part Number: MKL02Z32VFG4; Supplier: Newark; Supplier Part Number: 49X9712; RoHS: No
footprint 16-QFN (3x3).
pins: 1 VDD, 2 VSS, 3 PTA3, 4 PTA4, 5 PTA5, 6 PTA6, 7 PTA7, 8 PTB0, 9 PTB1, 10 PTB2, 11 PTB3, 12 PTB4, 13 PTB5, 14 PTA0, 15 PTA1, 16 PTA2, 17 VSS

## MM74HC00M
designator U?
IC GATE NAND 4CH 2-INP 14SOIC; Manufacturer: ON Semiconductor / Fairchild; Manufacturer Part Number: MM74HC00M; Number of Gates: 4; Propagation Delay: 15ns; Max Supply Voltage: 6V; Min Supply Voltage: 2V; Low Level Output Current: 5.2mA; High Level Output Current: -5.2mA; Logic Function: NAND GATE; Number of Outputs: 1; Number of Inputs: 2; Quiescent Current: 2uA; Turn-On Delay Time: 90ns; Voltage: 5V; Operating Supply Voltage: 2.5V; Supplier: Avnet; Supplier Part Number: MM74HC00M; RoHS: Yes; Item Type: IC; Stock: 5775; Pricing: 3847=0.1924, 3900=0.1872, 7700=0.182, 20000=0.1768, 39000=0.1716, 200000=0.1664, 390000=0.1612 (USD); Mounting Technology: Surface Mount; Case/Package: SOIC; Pins: 14; Min Operating Temperature: -40°C; Max Operating Temperature: 85°C; Packaging: Rail/Tube; Number of Circuits: 4; Series: 74HC; Output Current: 5.2mA; Number of Elements: 4; Technology: CMOS; Channels: 4; Nominal Supply Voltage: 6V; Length: 8.75mm; Width: 4mm; Height: 1.5mm; Radiation Hardening: No; RoHS Compliant: Yes; Lead Free: Lead Free; Reach SVHC Compliant: No; ComponentLink1URL: https://datasheet.ciiva.com/14100/mbmm74hc00-dat-en-14100074.pdf?src-supplier=Distrelec; ComponentLink1Description: https://datasheet.ciiva.com/14100/mbmm74hc00-dat-en-14100074.pdf?src-supplier=Distrelec; ComponentLink2URL: https://datasheet.ciiva.com/19477/786200-19477374.pdf?src-supplier=Jameco; ComponentLink2Description: https://datasheet.ciiva.com/19477/786200-19477374.pdf?src-supplier=Jameco; ComponentLink3URL: https://datasheet.ciiva.com/15090/getdatasheetpartid-44431-15090201.pdf?src-supplier=Verical; ComponentLink3Description: https://datasheet.ciiva.com/15090/getdatasheetpartid-44431-15090201.pdf?src-supplier=Verical; ComponentLink4URL: https://datasheet.ciiva.com/8248/mm74hc00-8248959.pdf?src-supplier=Avnet; ComponentLink4Description: https://datasheet.ciiva.com/8248/mm74hc00-8248959.pdf?src-supplier=Avnet; ComponentLink5URL: https://datasheet.ciiva.com/1862/mm74hc00-1862378.pdf?src-supplier=Digikey; ComponentLink5Description: https://datasheet.ciiva.com/1862/mm74hc00-1862378.pdf?src-supplier=Digikey
footprint SOIC-14
pins: 1 A1, 2 B1, 3 Y1, 4 A2, 5 B2, 6 Y2, 7 GND, 8 Y3, 9 A3, 10 B3, 11 Y4, 12 A4, 13 B4, 14 VCC

## MP2615CGQ-Z
designator U?
2.1A, 1- OR 2-CELL LI-ION BATTER; Manufacturer: Monolithic Power Systems; Manufacturer Part Number: MP2615CGQ-Z; Item Type: IC; Supplier 1: Digi-Key; RoHS: No; Category: Uncategorized; Stock 1: 5000; Pricing 1: 1=2.38000, 10=2.13500, 25=2.01400, 100=1.71590, 250=1.61120, 500=1.40980, 1000=1.16812, 2500=1.14000 (USD); Supplier Part Number 1: 1589-MP2615CGQ-ZCT-ND
footprint 16-QFN (3x3) (MP2615CGQ-Z)
pins: 1 SW, 2 VIN, 3 VCC, 4 CELL, 5 SEL , 6 ~{EN}, 7 N/C, 8 AGND, 9 BATT, 10 CSP, 11 ~{CHGOK}, 12 ~{ACOK}, 13 NTC, 14 TMR, 15 BST, 16 PGND

## MT25QL256ABA1EW9-0SIT TR
designator U?
IC FLASH 256MBIT SPI 8WPDFN; Manufacturer: Micron Technology; Manufacturer Part Number: MT25QL256ABA1EW9-0SIT TR; Memory Format: Non-Volatile,FLASH; Memory Size: 256Mb; Frequency: 133MHz; Supplier: Avnet; Supplier Part Number: MT25QL256ABA1EW9-0SIT TR; RoHS: No; Category: Memory; Stock: 8000; Pricing: 4000=4.0896, 8000=4.032, 16000=3.9168, 24000=3.8304, 32000=3.6864, 40000=3.6288, 400000=3.5712 (USD); Mounting Technology: Surface Mount; Min Operating Temperature: -40°C; Max Operating Temperature: 85°C; Packaging: Cut Tape; ComponentLink1URL: https://www.micron.com/~/media/documents/products/data-sheet/nor-flash/serial-nor/mt25q/die-rev-a/mt25q_qljs_l_256_aba_0.pdf?src-supplier=Digi-Key; ComponentLink1Description: https://www.micron.com/~/media/documents/products/data-sheet/nor-flash/serial-nor/mt25q/die-rev-a/mt25q_qljs_l_256_aba_0.pdf?src-supplier=Digi-Key; Item Type: IC
footprint 8-WPDFN (8x6) (MLP8)
pins: 1 S#, 2 DQ1, 3 W#/DQ2, 4 VSS, 5 DQ0, 6 C, 7 DQ3/HOLD#, 8 VCC, 9 GND